# Altium footprint library buck.PcbLib: 8 footprints
Each footprint in its own frame and in the unit in brackets; x right, y up, seen from the top. Pads: shape width x height; smd on the part's side, far side on the other; paste and mask are expansions set on the pad; w line width, h text height; cw(c..) or ccw(c..) is an arc to the next point about the centre after c.
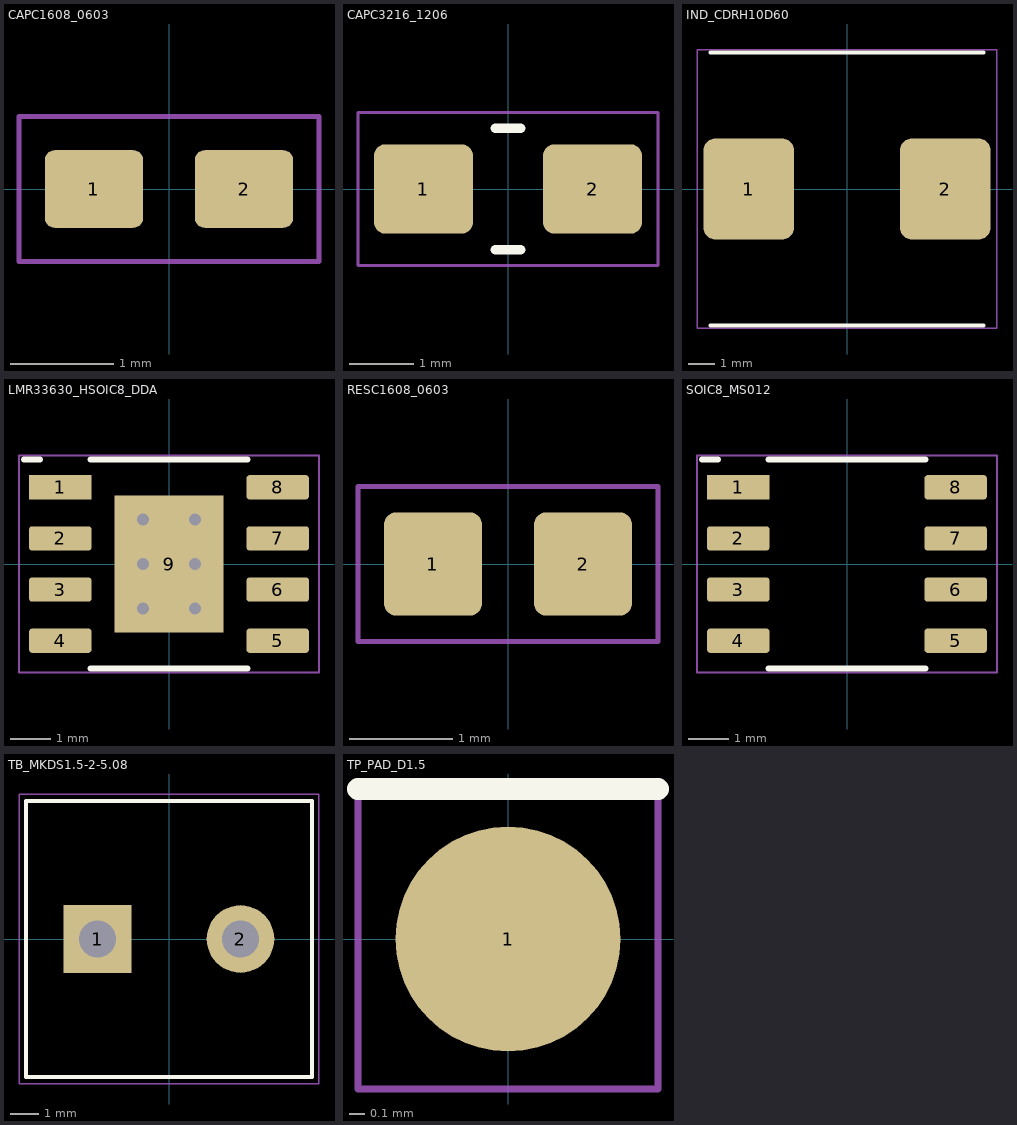
[diagram p0: the footprints below, top view; thin cyan lines are the x and y axes]

## CAPC1608_0603 [mm] "0603 MLCC: Yageo CC0603 / Samsung CL10; land width per Samsung rule"
height 0.9
pads (2):
  rrect25% 0.95x0.75 smd: 1(-0.725,0) 2(0.725,0)
Top Overlay:
  text ".Designator" at 0,0.975 h1
Top Courtyard:
  lines w0.05: -1.45,-0.7 1.45,-0.7 1.45,0.7 -1.45,0.7 -1.45,-0.7
3D body: height 0.9, standoff 0, extent -0.8,-0.45 0.8,0.45

## CAPC3216_1206 [mm] "1206 MLCC: Samsung CL31 / FH 1206; land width per Samsung rule 2/3W<b<W"
height 1.8
pads (2):
  rrect25% 1.55x1.4 smd: 1(-1.325,0) 2(1.325,0)
Top Overlay:
  lines w0.15: -0.2,-0.95 0.2,-0.95 ; -0.2,0.95 0.2,0.95
  text ".Designator" at 0,1.3 h1
Top Courtyard:
  lines w0.05: -2.35,-1.2 -2.35,1.2 2.35,1.2 2.35,-1.2 -2.35,-1.2
3D body: height 1.8, standoff 0, extent -1.6,-0.95 1.6,0.95

## IND_CDRH10D60 [mm] "Sumida CDRH10D60B/T150 reference land 3.4x3.8, gap 4.0; body 10.3x10.0x6.35 max"
height 6.35
pads (2):
  rrect25% 3.4x3.8 smd: 1(-3.7,0) 2(3.7,0)
Top Overlay:
  lines w0.15: -5.15,-5.15 5.15,-5.15 ; -5.15,5.15 5.15,5.15
  text ".Designator" at 0,2.5 h1
Top Courtyard:
  lines w0.05: -5.65,-5.25 -5.65,5.25 5.65,5.25 5.65,-5.25 -5.65,-5.25
3D body: height 6.35, standoff 0, extent -5.15,-5 5.15,5

## LMR33630_HSOIC8_DDA [mm] "TI DDA (HSOIC-8 PowerPAD) per SNVSAN3F DDA0008J/B; EP 2.71x3.4 fits J and B; 6 thermal vias 0.3/0.6 tented both sides (G1 2026-10-13)"
height 1.7
pads (9):
  rect 1.55x0.6 smd: 1(-2.7,1.905)
  rrect25% 1.55x0.6 smd: 2(-2.7,0.635) 3(-2.7,-0.635) 4(-2.7,-1.905) 5(2.7,-1.905) 6(2.7,-0.635) 7(2.7,0.635) 8(2.7,1.905)
  rect 2.71x3.4 smd paste-0.1: 9(0,0)
via 0.65,1.1 diameter 0.6 hole 0.3
via -0.65,1.1 diameter 0.6 hole 0.3
via 0.65,0 diameter 0.6 hole 0.3
via -0.65,0 diameter 0.6 hole 0.3
via 0.65,-1.1 diameter 0.6 hole 0.3
via -0.65,-1.1 diameter 0.6 hole 0.3
Top Overlay:
  lines w0.15: -3.6,2.6 -3.2,2.6 ; -1.95,-2.6 1.95,-2.6 ; -1.95,2.6 1.95,2.6
  text ".Designator" at 0,2.805 h1
Top Courtyard:
  lines w0.05: -3.725,-2.7 -3.725,2.7 3.725,2.7 3.725,-2.7 -3.725,-2.7
3D body: height 1.7, standoff 0, extent -1.95,-2.45 1.95,2.45

## RESC1608_0603 [mm] "0603 chip resistor: UNI-ROYAL 0603WAF / RESI PTFR0603"
height 0.55
pads (2):
  rrect25% 0.95x1 smd: 1(-0.725,0) 2(0.725,0)
Top Overlay:
  text ".Designator" at 0,1.1 h1
Top Courtyard:
  lines w0.05: -1.45,-0.75 -1.45,0.75 1.45,0.75 1.45,-0.75 -1.45,-0.75
3D body: height 0.55, standoff 0, extent -0.8,-0.45 0.8,0.45

## SOIC8_MS012 [mm] "SO-8 (JEDEC MS-012) for AO4407C; signal-pad land from TI DDA0008 (also MS-012)"
height 1.75
pads (8):
  rect 1.55x0.6 smd: 1(-2.7,1.905)
  rrect25% 1.55x0.6 smd: 2(-2.7,0.635) 3(-2.7,-0.635) 4(-2.7,-1.905) 5(2.7,-1.905) 6(2.7,-0.635) 7(2.7,0.635) 8(2.7,1.905)
Top Overlay:
  lines w0.15: -3.6,2.6 -3.2,2.6 ; -1.95,-2.6 1.95,-2.6 ; -1.95,2.6 1.95,2.6
  text ".Designator" at 0,2.805 h1
Top Courtyard:
  lines w0.05: -3.725,-2.7 3.725,-2.7 3.725,2.7 -3.725,2.7 -3.725,-2.7
3D body: height 1.75, standoff 0, extent -1.95,-2.45 1.95,2.45

## TB_MKDS1.5-2-5.08 [mm] "Phoenix MKDS 1,5/2-5,08 (1715721): pitch 5.08, hole 1.3, pin 0.9x0.9"
height 13.8
pads (2):
  rect 2.4x2.4 hole 1.3: 1(-2.54,0)
  round 2.4 hole 1.3: 2(2.54,0)
Top Overlay:
  lines w0.15: -5.08,-4.9 5.08,-4.9 5.08,4.9 -5.08,4.9 -5.08,-4.9
  text ".Designator" at 0,1.8 h1
Top Courtyard:
  lines w0.05: -5.33,-5.15 5.33,-5.15 5.33,5.15 -5.33,5.15 -5.33,-5.15
3D body: height 13.8, standoff 0, extent -5.08,-4.9 5.08,4.9

## TP_PAD_D1.5 [mm] "SMD test pad 1.5 mm, no paste, no component body"
pads (1):
  round 1.5 smd paste-0.75: 1(0,0)
Top Overlay:
  lines w0.15: -1,1 1,1
  text ".Designator" at 0,1.35 h1
Top Courtyard:
  lines w0.05: -1,-1 -1,1 1,1 1,-1 -1,-1